# Altium footprint library Package_BGA.PcbLib: 230 footprints (part 1 of 28)
Each footprint in its own frame and in the unit in brackets; x right, y up, seen from the top. Pads: shape width x height; smd on the part's side, far side on the other; paste and mask are expansions set on the pad; w line width, h text height; cw(c..) or ccw(c..) is an arc to the next point about the centre after c.
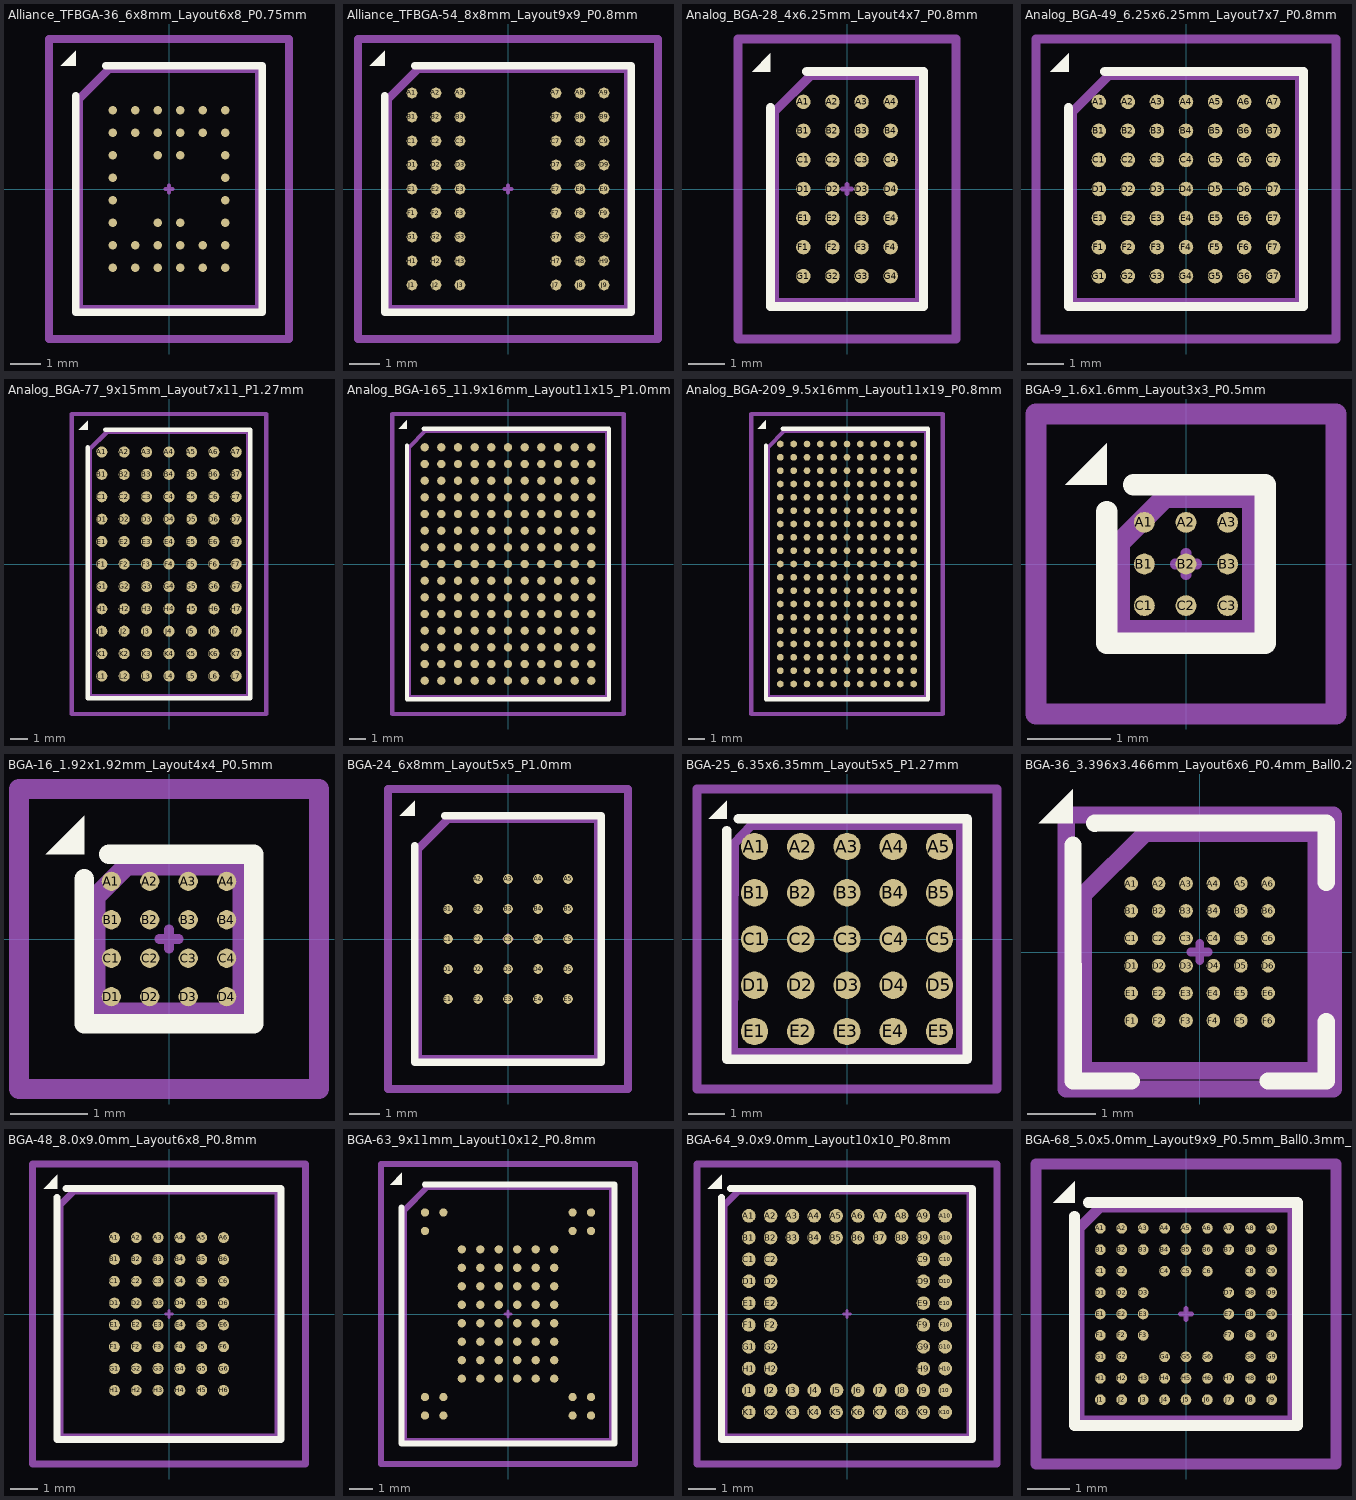
[diagram p0: the footprints below, top view; thin cyan lines are the x and y axes]

## Alliance_TFBGA-36_6x8mm_Layout6x8_P0.75mm [mm] "Alliance_TFBGA-36_6x8mm_Layout6x8_P0.75mm"
pads (36):
  round 0.28 smd: A1(-1.875,2.625) A2(-1.125,2.625) A3(-0.375,2.625) A4(0.375,2.625) A5(1.125,2.625) A6(1.875,2.625) B1(-1.875,1.875) B2(-1.125,1.875) B3(-0.375,1.875) B4(0.375,1.875) B5(1.125,1.875) B6(1.875,1.875) C1(-1.875,1.125) C3(-0.375,1.125) C4(0.375,1.125) C6(1.875,1.125) D1(-1.875,0.375) D6(1.875,0.375) E1(-1.875,-0.375) E6(1.875,-0.375) F1(-1.875,-1.125) F3(-0.375,-1.125) F4(0.375,-1.125) F6(1.875,-1.125) G1(-1.875,-1.875) G2(-1.125,-1.875) G3(-0.375,-1.875) G4(0.375,-1.875) G5(1.125,-1.875) G6(1.875,-1.875) H1(-1.875,-2.625) H2(-1.125,-2.625) H3(-0.375,-2.625) H4(0.375,-2.625) H5(1.125,-2.625) H6(1.875,-2.625)
F.SilkS:
  region: -3.11,4.11 -3.61,4.11 -3.11,4.61
  lines w0.254: -3.11,3.11 -3.11,-4.11 3.11,-4.11 3.11,4.11 -2.11,4.11
Top Component Center:
  lines w0.127: -0.127,0 0.127,0 -0.127,0 ; 0,-0.127 0,0.127 0,-0.127
Top Assembly:
  lines w0.254: -3,-4 3,-4 3,4 -2,4 -3,3 -3,-4
Top Courtyard:
  lines w0.254: -4,-5 4,-5 4,5 -4,5 -4,-5
Top Designator:
  text ".Designator" at -3.432,-0.345 h1.52

## Alliance_TFBGA-54_8x8mm_Layout9x9_P0.8mm [mm] "Alliance_TFBGA-54_8x8mm_Layout9x9_P0.8mm"
pads (54):
  round 0.36 smd: A1(-3.2,3.2) A2(-2.4,3.2) A3(-1.6,3.2) A7(1.6,3.2) A8(2.4,3.2) A9(3.2,3.2) B1(-3.2,2.4) B2(-2.4,2.4) B3(-1.6,2.4) B7(1.6,2.4) B8(2.4,2.4) B9(3.2,2.4) C1(-3.2,1.6) C2(-2.4,1.6) C3(-1.6,1.6) C7(1.6,1.6) C8(2.4,1.6) C9(3.2,1.6) D1(-3.2,0.8) D2(-2.4,0.8) D3(-1.6,0.8) D7(1.6,0.8) D8(2.4,0.8) D9(3.2,0.8) E1(-3.2,0) E2(-2.4,0) E3(-1.6,0) E7(1.6,0) E8(2.4,0) E9(3.2,0) F1(-3.2,-0.8) F2(-2.4,-0.8) F3(-1.6,-0.8) F7(1.6,-0.8) F8(2.4,-0.8) F9(3.2,-0.8) G1(-3.2,-1.6) G2(-2.4,-1.6) G3(-1.6,-1.6) G7(1.6,-1.6) G8(2.4,-1.6) G9(3.2,-1.6) H1(-3.2,-2.4) H2(-2.4,-2.4) H3(-1.6,-2.4) H7(1.6,-2.4) H8(2.4,-2.4) H9(3.2,-2.4) J1(-3.2,-3.2) J2(-2.4,-3.2) J3(-1.6,-3.2) J7(1.6,-3.2) J8(2.4,-3.2) J9(3.2,-3.2)
F.SilkS:
  region: -4.11,4.11 -4.61,4.11 -4.11,4.61
  lines w0.254: -4.11,3.11 -4.11,-4.11 4.11,-4.11 4.11,4.11 -3.11,4.11
Top Component Center:
  lines w0.127: -0.127,0 0.127,0 -0.127,0 ; 0,-0.127 0,0.127 0,-0.127
Top Assembly:
  lines w0.254: -4,-4 -4,3 -3,4 4,4 4,-4 -4,-4
Top Courtyard:
  lines w0.254: -5,-5 -5,5 5,5 5,-5 -5,-5
Top Designator:
  text ".Designator" at -3.432,-0.345 h1.52

## Analog_BGA-28_4x6.25mm_Layout4x7_P0.8mm [mm] "Analog_BGA-28_4x6.25mm_Layout4x7_P0.8mm"
pads (28):
  round 0.4 smd: A1(-1.2,2.4) A2(-0.4,2.4) A3(0.4,2.4) A4(1.2,2.4) B1(-1.2,1.6) B2(-0.4,1.6) B3(0.4,1.6) B4(1.2,1.6) C1(-1.2,0.8) C2(-0.4,0.8) C3(0.4,0.8) C4(1.2,0.8) D1(-1.2,0) D2(-0.4,0) D3(0.4,0) D4(1.2,0) E1(-1.2,-0.8) E2(-0.4,-0.8) E3(0.4,-0.8) E4(1.2,-0.8) F1(-1.2,-1.6) F2(-0.4,-1.6) F3(0.4,-1.6) F4(1.2,-1.6) G1(-1.2,-2.4) G2(-0.4,-2.4) G3(0.4,-2.4) G4(1.2,-2.4)
F.SilkS:
  region: -2.11,3.235 -2.61,3.235 -2.11,3.735
  lines w0.254: -2.11,2.235 -2.11,-3.235 2.11,-3.235 2.11,3.235 -1.11,3.235
Top Component Center:
  lines w0.127: -0.127,0 0.127,0 -0.127,0 ; 0,-0.127 0,0.127 0,-0.127
Top Assembly:
  lines w0.254: -2,-3.125 -2,2.125 -1,3.125 2,3.125 2,-3.125 -2,-3.125
Top Courtyard:
  lines w0.254: -3,-4.13 -3,4.13 3,4.13 3,-4.13 -3,-4.13
Top Designator:
  text ".Designator" at -3.432,-0.345 h1.52

## Analog_BGA-49_6.25x6.25mm_Layout7x7_P0.8mm [mm] "Analog_BGA-49_6.25x6.25mm_Layout7x7_P0.8mm"
pads (49):
  round 0.4 smd: A1(-2.4,2.4) A2(-1.6,2.4) A3(-0.8,2.4) A4(0,2.4) A5(0.8,2.4) A6(1.6,2.4) A7(2.4,2.4) B1(-2.4,1.6) B2(-1.6,1.6) B3(-0.8,1.6) B4(0,1.6) B5(0.8,1.6) B6(1.6,1.6) B7(2.4,1.6) C1(-2.4,0.8) C2(-1.6,0.8) C3(-0.8,0.8) C4(0,0.8) C5(0.8,0.8) C6(1.6,0.8) C7(2.4,0.8) D1(-2.4,0) D2(-1.6,0) D3(-0.8,0) D4(0,0) D5(0.8,0) D6(1.6,0) D7(2.4,0) E1(-2.4,-0.8) E2(-1.6,-0.8) E3(-0.8,-0.8) E4(0,-0.8) E5(0.8,-0.8) E6(1.6,-0.8) E7(2.4,-0.8) F1(-2.4,-1.6) F2(-1.6,-1.6) F3(-0.8,-1.6) F4(0,-1.6) F5(0.8,-1.6) F6(1.6,-1.6) F7(2.4,-1.6) G1(-2.4,-2.4) G2(-1.6,-2.4) G3(-0.8,-2.4) G4(0,-2.4) G5(0.8,-2.4) G6(1.6,-2.4) G7(2.4,-2.4)
F.SilkS:
  region: -3.235,3.235 -3.735,3.235 -3.235,3.735
  lines w0.254: -3.235,2.235 -3.235,-3.235 3.235,-3.235 3.235,3.235 -2.235,3.235
Top Component Center:
  lines w0.127: -0.127,0 0.127,0 -0.127,0 ; 0,-0.127 0,0.127 0,-0.127
Top Assembly:
  lines w0.254: -3.125,-3.125 -3.125,2.125 -2.125,3.125 3.125,3.125 3.125,-3.125 -3.125,-3.125
Top Courtyard:
  lines w0.254: -4.13,-4.13 -4.13,4.13 4.13,4.13 4.13,-4.13 -4.13,-4.13
Top Designator:
  text ".Designator" at -3.432,-0.345 h1.52
3D body "Analog_BGA-49_6.25x6.25mm_Layout7x7_P0.8mm.step": height 2.1, standoff -0.01, extent -3.125,-3.125 3.125,3.125
3D body "Analog_BGA-49_6.25x6.25mm_Layout7x7_P0.8mm.step": height 2.1, standoff -0.01, extent -3.125,-3.125 3.125,3.125

## Analog_BGA-77_9x15mm_Layout7x11_P1.27mm [mm] "Analog_BGA-77_9x15mm_Layout7x11_P1.27mm"
pads (77):
  round 0.63 smd: A1(-3.81,6.35) A2(-2.54,6.35) A3(-1.27,6.35) A4(0,6.35) A5(1.27,6.35) A6(2.54,6.35) A7(3.81,6.35) B1(-3.81,5.08) B2(-2.54,5.08) B3(-1.27,5.08) B4(0,5.08) B5(1.27,5.08) B6(2.54,5.08) B7(3.81,5.08) C1(-3.81,3.81) C2(-2.54,3.81) C3(-1.27,3.81) C4(0,3.81) C5(1.27,3.81) C6(2.54,3.81) C7(3.81,3.81) D1(-3.81,2.54) D2(-2.54,2.54) D3(-1.27,2.54) D4(0,2.54) D5(1.27,2.54) D6(2.54,2.54) D7(3.81,2.54) E1(-3.81,1.27) E2(-2.54,1.27) E3(-1.27,1.27) E4(0,1.27) E5(1.27,1.27) E6(2.54,1.27) E7(3.81,1.27) F1(-3.81,0) F2(-2.54,0) F3(-1.27,0) F4(0,0) F5(1.27,0) F6(2.54,0) F7(3.81,0) G1(-3.81,-1.27) G2(-2.54,-1.27) G3(-1.27,-1.27) G4(0,-1.27) G5(1.27,-1.27) G6(2.54,-1.27) G7(3.81,-1.27) H1(-3.81,-2.54) H2(-2.54,-2.54) H3(-1.27,-2.54) H4(0,-2.54) H5(1.27,-2.54) H6(2.54,-2.54) H7(3.81,-2.54) J1(-3.81,-3.81) J2(-2.54,-3.81) J3(-1.27,-3.81) J4(0,-3.81) J5(1.27,-3.81) J6(2.54,-3.81) J7(3.81,-3.81) K1(-3.81,-5.08) K2(-2.54,-5.08) K3(-1.27,-5.08) K4(0,-5.08) K5(1.27,-5.08) K6(2.54,-5.08) K7(3.81,-5.08) L1(-3.81,-6.35) L2(-2.54,-6.35) L3(-1.27,-6.35) L4(0,-6.35) L5(1.27,-6.35) L6(2.54,-6.35) L7(3.81,-6.35)
F.SilkS:
  region: -4.61,7.61 -5.11,7.61 -4.61,8.11
  lines w0.254: -4.61,6.61 -4.61,-7.61 4.61,-7.61 4.61,7.61 -3.61,7.61
Top Component Center:
  lines w0.127: -0.127,0 0.127,0 -0.127,0 ; 0,-0.127 0,0.127 0,-0.127
Top Assembly:
  lines w0.254: -4.5,-7.5 4.5,-7.5 4.5,7.5 -3.5,7.5 -4.5,6.5 -4.5,-7.5
Top Courtyard:
  lines w0.254: -5.5,-8.5 5.5,-8.5 5.5,8.5 -5.5,8.5 -5.5,-8.5
Top Designator:
  text ".Designator" at -3.432,-0.345 h1.52
3D body "Analog_BGA-77_9x15mm_Layout7x11_P1.27mm.step": height 2.37, standoff -0.07, extent -4.5,-7.5 4.5,7.5

## Analog_BGA-165_11.9x16mm_Layout11x15_P1.0mm [mm] "Analog_BGA-165_11.9x16mm_Layout11x15_P1.0mm"
pads (165):
  round 0.5 smd: A1(-5,7) A2(-4,7) A3(-3,7) A4(-2,7) A5(-1,7) A6(0,7) A7(1,7) A8(2,7) A9(3,7) A10(4,7) A11(5,7) B1(-5,6) B2(-4,6) B3(-3,6) B4(-2,6) B5(-1,6) B6(0,6) B7(1,6) B8(2,6) B9(3,6) B10(4,6) B11(5,6) C1(-5,5) C2(-4,5) C3(-3,5) C4(-2,5) C5(-1,5) C6(0,5) C7(1,5) C8(2,5) C9(3,5) C10(4,5) C11(5,5) D1(-5,4) D2(-4,4) D3(-3,4) D4(-2,4) D5(-1,4) D6(0,4) D7(1,4) D8(2,4) D9(3,4) D10(4,4) D11(5,4) E1(-5,3) E2(-4,3) E3(-3,3) E4(-2,3) E5(-1,3) E6(0,3) E7(1,3) E8(2,3) E9(3,3) E10(4,3) E11(5,3) F1(-5,2) F2(-4,2) F3(-3,2) F4(-2,2) F5(-1,2) F6(0,2) F7(1,2) F8(2,2) F9(3,2) F10(4,2) F11(5,2) G1(-5,1) G2(-4,1) G3(-3,1) G4(-2,1) G5(-1,1) G6(0,1) G7(1,1) G8(2,1) G9(3,1) G10(4,1) G11(5,1) H1(-5,0) H2(-4,0) H3(-3,0) H4(-2,0) H5(-1,0) H6(0,0) H7(1,0) H8(2,0) H9(3,0) H10(4,0) H11(5,0) J1(-5,-1) J2(-4,-1) J3(-3,-1) J4(-2,-1) J5(-1,-1) J6(0,-1) J7(1,-1) J8(2,-1) J9(3,-1) J10(4,-1) J11(5,-1) K1(-5,-2) K2(-4,-2) K3(-3,-2) K4(-2,-2) K5(-1,-2) K6(0,-2) K7(1,-2) K8(2,-2) K9(3,-2) K10(4,-2) K11(5,-2) L1(-5,-3) L2(-4,-3) L3(-3,-3) L4(-2,-3) L5(-1,-3) L6(0,-3) L7(1,-3) L8(2,-3) L9(3,-3) L10(4,-3) L11(5,-3) M1(-5,-4) M2(-4,-4) M3(-3,-4) M4(-2,-4) M5(-1,-4) M6(0,-4) M7(1,-4) M8(2,-4) M9(3,-4) M10(4,-4) M11(5,-4) N1(-5,-5) N2(-4,-5) N3(-3,-5) N4(-2,-5) N5(-1,-5) N6(0,-5) N7(1,-5) N8(2,-5) N9(3,-5) N10(4,-5) N11(5,-5) P1(-5,-6) P2(-4,-6) P3(-3,-6) P4(-2,-6) P5(-1,-6) P6(0,-6) P7(1,-6) P8(2,-6) P9(3,-6) P10(4,-6) P11(5,-6) R1(-5,-7) R2(-4,-7) R3(-3,-7) R4(-2,-7) R5(-1,-7) R6(0,-7) R7(1,-7) R8(2,-7) R9(3,-7) R10(4,-7) R11(5,-7)
F.SilkS:
  region: -6.06,8.11 -6.56,8.11 -6.06,8.61
  lines w0.254: -6.06,7.11 -6.06,-8.11 6.06,-8.11 6.06,8.11 -5.06,8.11
Top Component Center:
  lines w0.127: -0.127,0 0.127,0 -0.127,0 ; 0,-0.127 0,0.127 0,-0.127
Top Assembly:
  lines w0.254: -5.95,-8 -5.95,7 -4.95,8 5.95,8 5.95,-8 -5.95,-8
Top Courtyard:
  lines w0.254: -6.95,-9 -6.95,9 6.95,9 6.95,-9 -6.95,-9
Top Designator:
  text ".Designator" at -3.432,-0.345 h1.52
3D body "Analog_BGA-165_11.9x16mm_Layout11x15_P1.0mm.step": height 3.32, standoff -0.02, extent -5.95,-8 5.95,8

## Analog_BGA-209_9.5x16mm_Layout11x19_P0.8mm [mm] "Analog_BGA-209_9.5x16mm_Layout11x19_P0.8mm"
pads (209):
  round 0.4 smd: A1(-4,7.2) A2(-3.2,7.2) A3(-2.4,7.2) A4(-1.6,7.2) A5(-0.8,7.2) A6(0,7.2) A7(0.8,7.2) A8(1.6,7.2) A9(2.4,7.2) A10(3.2,7.2) A11(4,7.2) B1(-4,6.4) B2(-3.2,6.4) B3(-2.4,6.4) B4(-1.6,6.4) B5(-0.8,6.4) B6(0,6.4) B7(0.8,6.4) B8(1.6,6.4) B9(2.4,6.4) B10(3.2,6.4) B11(4,6.4) C1(-4,5.6) C2(-3.2,5.6) C3(-2.4,5.6) C4(-1.6,5.6) C5(-0.8,5.6) C6(0,5.6) C7(0.8,5.6) C8(1.6,5.6) C9(2.4,5.6) C10(3.2,5.6) C11(4,5.6) D1(-4,4.8) D2(-3.2,4.8) D3(-2.4,4.8) D4(-1.6,4.8) D5(-0.8,4.8) D6(0,4.8) D7(0.8,4.8) D8(1.6,4.8) D9(2.4,4.8) D10(3.2,4.8) D11(4,4.8) E1(-4,4) E2(-3.2,4) E3(-2.4,4) E4(-1.6,4) E5(-0.8,4) E6(0,4) E7(0.8,4) E8(1.6,4) E9(2.4,4) E10(3.2,4) E11(4,4) F1(-4,3.2) F2(-3.2,3.2) F3(-2.4,3.2) F4(-1.6,3.2) F5(-0.8,3.2) F6(0,3.2) F7(0.8,3.2) F8(1.6,3.2) F9(2.4,3.2) F10(3.2,3.2) F11(4,3.2) G1(-4,2.4) G2(-3.2,2.4) G3(-2.4,2.4) G4(-1.6,2.4) G5(-0.8,2.4) G6(0,2.4) G7(0.8,2.4) G8(1.6,2.4) G9(2.4,2.4) G10(3.2,2.4) G11(4,2.4) H1(-4,1.6) H2(-3.2,1.6) H3(-2.4,1.6) H4(-1.6,1.6) H5(-0.8,1.6) H6(0,1.6) H7(0.8,1.6) H8(1.6,1.6) H9(2.4,1.6) H10(3.2,1.6) H11(4,1.6) J1(-4,0.8) J2(-3.2,0.8) J3(-2.4,0.8) J4(-1.6,0.8) J5(-0.8,0.8) J6(0,0.8) J7(0.8,0.8) J8(1.6,0.8) J9(2.4,0.8) J10(3.2,0.8) J11(4,0.8) K1(-4,0) K2(-3.2,0) K3(-2.4,0) K4(-1.6,0) K5(-0.8,0) K6(0,0) K7(0.8,0) K8(1.6,0) K9(2.4,0) K10(3.2,0) K11(4,0) L1(-4,-0.8) L2(-3.2,-0.8) L3(-2.4,-0.8) L4(-1.6,-0.8) L5(-0.8,-0.8) L6(0,-0.8) L7(0.8,-0.8) L8(1.6,-0.8) L9(2.4,-0.8) L10(3.2,-0.8) L11(4,-0.8) M1(-4,-1.6) M2(-3.2,-1.6) M3(-2.4,-1.6) M4(-1.6,-1.6) M5(-0.8,-1.6) M6(0,-1.6) M7(0.8,-1.6) M8(1.6,-1.6) M9(2.4,-1.6) M10(3.2,-1.6) M11(4,-1.6) N1(-4,-2.4) N2(-3.2,-2.4) N3(-2.4,-2.4) N4(-1.6,-2.4) N5(-0.8,-2.4) N6(0,-2.4) N7(0.8,-2.4) N8(1.6,-2.4) N9(2.4,-2.4) N10(3.2,-2.4) N11(4,-2.4) P1(-4,-3.2) P2(-3.2,-3.2) P3(-2.4,-3.2) P4(-1.6,-3.2) P5(-0.8,-3.2) P6(0,-3.2) P7(0.8,-3.2) P8(1.6,-3.2) P9(2.4,-3.2) P10(3.2,-3.2) P11(4,-3.2) R1(-4,-4) R2(-3.2,-4) R3(-2.4,-4) R4(-1.6,-4) R5(-0.8,-4) R6(0,-4) R7(0.8,-4) R8(1.6,-4) R9(2.4,-4) R10(3.2,-4) R11(4,-4) T1(-4,-4.8) T2(-3.2,-4.8) T3(-2.4,-4.8) T4(-1.6,-4.8) T5(-0.8,-4.8) T6(0,-4.8) T7(0.8,-4.8) T8(1.6,-4.8) T9(2.4,-4.8) T10(3.2,-4.8) T11(4,-4.8) U1(-4,-5.6) U2(-3.2,-5.6) U3(-2.4,-5.6) U4(-1.6,-5.6) U5(-0.8,-5.6) U6(0,-5.6) U7(0.8,-5.6) U8(1.6,-5.6) U9(2.4,-5.6) U10(3.2,-5.6) U11(4,-5.6) V1(-4,-6.4) V2(-3.2,-6.4) V3(-2.4,-6.4) V4(-1.6,-6.4) V5(-0.8,-6.4) V6(0,-6.4) V7(0.8,-6.4) V8(1.6,-6.4) V9(2.4,-6.4) V10(3.2,-6.4) V11(4,-6.4) W1(-4,-7.2) W2(-3.2,-7.2) W3(-2.4,-7.2) W4(-1.6,-7.2) W5(-0.8,-7.2) W6(0,-7.2) W7(0.8,-7.2) W8(1.6,-7.2) W9(2.4,-7.2) W10(3.2,-7.2) W11(4,-7.2)
F.SilkS:
  region: -4.86,8.11 -5.36,8.11 -4.86,8.61
  lines w0.254: -4.86,7.11 -4.86,-8.11 4.86,-8.11 4.86,8.11 -3.86,8.11
Top Component Center:
  lines w0.127: -0.127,0 0.127,0 -0.127,0 ; 0,-0.127 0,0.127 0,-0.127
Top Assembly:
  lines w0.254: -4.75,-8 4.75,-8 4.75,8 -3.75,8 -4.75,7 -4.75,-8
Top Courtyard:
  lines w0.254: -5.75,-9 5.75,-9 5.75,9 -5.75,9 -5.75,-9
Top Designator:
  text ".Designator" at -3.432,-0.345 h1.52
3D body "Analog_BGA-209_9.5x16mm_Layout11x19_P0.8mm.step": height 4.72, standoff -0.01, extent -4.75,-8 4.75,8
3D body "Analog_BGA-209_9.5x16mm_Layout11x19_P0.8mm.step": height 4.72, standoff -0.01, extent -4.75,-8 4.75,8

## BGA-9_1.6x1.6mm_Layout3x3_P0.5mm [mm] "BGA-9_1.6x1.6mm_Layout3x3_P0.5mm"
pads (9):
  round 0.25 smd: A1(-0.5,0.5) A2(0,0.5) A3(0.5,0.5) B1(-0.5,0) B2(0,0) B3(0.5,0) C1(-0.5,-0.5) C2(0,-0.5) C3(0.5,-0.5)
F.SilkS:
  region: -0.95,0.95 -1.45,0.95 -0.95,1.45
  lines w0.254: -0.95,0.63 -0.95,-0.95 0.95,-0.95 0.95,0.95 -0.63,0.95
Top Component Center:
  lines w0.127: -0.127,0 0.127,0 -0.127,0 ; 0,-0.127 0,0.127 0,-0.127
Top Assembly:
  lines w0.254: -0.8,-0.8 -0.8,0.25 -0.25,0.8 0.8,0.8 0.8,-0.8 -0.8,-0.8
Top Courtyard:
  lines w0.254: -1.8,-1.8 -1.8,1.8 1.8,1.8 1.8,-1.8 -1.8,-1.8
Top Designator:
  text ".Designator" at -2.253,-0.226 h1
3D body "BGA-9_1.6x1.6mm_Layout3x3_P0.5mm.step": height 0.63, standoff -0.01, extent -0.8,-0.8 0.8,0.8
3D body "BGA-9_1.6x1.6mm_Layout3x3_P0.5mm.step": height 0.63, standoff -0.01, extent -0.8,-0.8 0.8,0.8

## BGA-16_1.92x1.92mm_Layout4x4_P0.5mm [mm] "BGA-16_1.92x1.92mm_Layout4x4_P0.5mm"
pads (16):
  round 0.25 smd: A1(-0.75,0.75) A2(-0.25,0.75) A3(0.25,0.75) A4(0.75,0.75) B1(-0.75,0.25) B2(-0.25,0.25) B3(0.25,0.25) B4(0.75,0.25) C1(-0.75,-0.25) C2(-0.25,-0.25) C3(0.25,-0.25) C4(0.75,-0.25) D1(-0.75,-0.75) D2(-0.25,-0.75) D3(0.25,-0.75) D4(0.75,-0.75)
F.SilkS:
  region: -1.1,1.1 -1.6,1.1 -1.1,1.6
  lines w0.254: -1.1,0.78 -1.1,-1.1 1.1,-1.1 1.1,1.1 -0.78,1.1
Top Component Center:
  lines w0.127: -0.127,0 0.127,0 -0.127,0 ; 0,-0.127 0,0.127 0,-0.127
Top Assembly:
  lines w0.254: -0.95,-0.95 -0.95,0.55 -0.55,0.95 0.95,0.95 0.95,-0.95 -0.95,-0.95
Top Courtyard:
  lines w0.254: -1.95,-1.95 -1.95,1.95 1.95,1.95 1.95,-1.95 -1.95,-1.95
Top Designator:
  text ".Designator" at -3.432,-0.345 h1.52
3D body "BGA-16_1.92x1.92mm_Layout4x4_P0.5mm.step": height 0.65, standoff -0.01, extent -0.96,-0.96 0.96,0.96
3D body "BGA-16_1.92x1.92mm_Layout4x4_P0.5mm.step": height 0.65, standoff -0.01, extent -0.96,-0.96 0.96,0.96

## BGA-24_6x8mm_Layout5x5_P1.0mm [mm] "BGA-24_6x8mm_Layout5x5_P1.0mm"
pads (24):
  round 0.32 smd: A2(-1,2) A3(0,2) A4(1,2) A5(2,2) B1(-2,1) B2(-1,1) B3(0,1) B4(1,1) B5(2,1) C1(-2,0) C2(-1,0) C3(0,0) C4(1,0) C5(2,0) D1(-2,-1) D2(-1,-1) D3(0,-1) D4(1,-1) D5(2,-1) E1(-2,-2) E2(-1,-2) E3(0,-2) E4(1,-2) E5(2,-2)
F.SilkS:
  region: -3.11,4.11 -3.61,4.11 -3.11,4.61
  lines w0.254: -3.11,3.11 -3.11,-4.11 3.11,-4.11 3.11,4.11 -2.11,4.11
Top Component Center:
  lines w0.127: -0.127,0 0.127,0 -0.127,0 ; 0,-0.127 0,0.127 0,-0.127
Top Assembly:
  lines w0.254: -3,-4 3,-4 3,4 -2,4 -3,3 -3,-4
Top Courtyard:
  lines w0.254: -4,-5 4,-5 4,5 -4,5 -4,-5
Top Designator:
  text ".Designator" at -3.432,-0.345 h1.52

## BGA-25_6.35x6.35mm_Layout5x5_P1.27mm [mm] "BGA-25_6.35x6.35mm_Layout5x5_P1.27mm"
pads (25):
  round 0.75 smd: A1(-2.54,2.54) A2(-1.27,2.54) A3(0,2.54) A4(1.27,2.54) A5(2.54,2.54) B1(-2.54,1.27) B2(-1.27,1.27) B3(0,1.27) B4(1.27,1.27) B5(2.54,1.27) C1(-2.54,0) C2(-1.27,0) C3(0,0) C4(1.27,0) C5(2.54,0) D1(-2.54,-1.27) D2(-1.27,-1.27) D3(0,-1.27) D4(1.27,-1.27) D5(2.54,-1.27) E1(-2.54,-2.54) E2(-1.27,-2.54) E3(0,-2.54) E4(1.27,-2.54) E5(2.54,-2.54)
F.SilkS:
  region: -3.3,3.3 -3.8,3.3 -3.3,3.8
  lines w0.254: -3.3,2.98 -3.3,-3.3 3.3,-3.3 3.3,3.3 -2.99,3.3
Top Component Center:
  lines w0.127: -0.127,0 0.127,0 -0.127,0 ; 0,-0.127 0,0.127 0,-0.127
Top Assembly:
  lines w0.254: -3.12,-3.12 -3.1,2.62 -2.62,3.12 3.12,3.12 3.12,-3.12 -3.12,-3.12
Top Courtyard:
  lines w0.254: -4.12,-4.12 -4.12,4.12 4.12,4.12 4.12,-4.12 -4.12,-4.12
Top Designator:
  text ".Designator" at -3.432,-0.345 h1.52
3D body "BGA-25_6.35x6.35mm_Layout5x5_P1.27mm.step": height 5.01, standoff -0.02, extent -3.125,-3.125 3.125,3.125

## BGA-36_3.396x3.466mm_Layout6x6_P0.4mm_Ball0.25mm_Pad0.2mm_NSMD [mm] "BGA-36_3.396x3.466mm_Layout6x6_P0.4mm_Ball0.25mm_Pad0.2mm_NSMD"
pads (36):
  round 0.2 smd: A1(-1,1) A2(-0.6,1) A3(-0.2,1) A4(0.2,1) A5(0.6,1) A6(1,1) B1(-1,0.6) B2(-0.6,0.6) B3(-0.2,0.6) B4(0.2,0.6) B5(0.6,0.6) B6(1,0.6) C1(-1,0.2) C2(-0.6,0.2) C3(-0.2,0.2) C4(0.2,0.2) C5(0.6,0.2) C6(1,0.2) D1(-1,-0.2) D2(-0.6,-0.2) D3(-0.2,-0.2) D4(0.2,-0.2) D5(0.6,-0.2) D6(1,-0.2) E1(-1,-0.6) E2(-0.6,-0.6) E3(-0.2,-0.6) E4(0.2,-0.6) E5(0.6,-0.6) E6(1,-0.6) F1(-1,-1) F2(-0.6,-1) F3(-0.2,-1) F4(0.2,-1) F5(0.6,-1) F6(1,-1)
F.SilkS:
  region: -1.85,1.88 -2.35,1.88 -1.85,2.38
  lines w0.254: -1.85,1.56 -1.848,-1.883 -0.999,-1.883 ; -1.53,1.88 1.848,1.883 ; 0.999,-1.883 1.848,-1.883 1.848,-1.017 ; 1.848,1.017 1.848,1.883 ; 1.848,1.017 1.848,1.883 ; 1.848,1.017 1.848,1.883 ; 1.848,1.883 0.999,1.883 1.848,1.883
Top Component Center:
  lines w0.127: -0.127,0 0.127,0 -0.127,0 ; 0,-0.127 0,0.127 0,-0.127
Top Assembly:
  lines w0.254: -1.698,-1.733 1.698,-1.733 1.698,1.733 -0.798,1.733 -1.698,0.833 -1.698,-1.733
Top Courtyard:
  lines w0.254: -1.95,-2 1.95,-2 1.95,2 -1.95,2 -1.95,-2
Top Designator:
  text ".Designator" at -3.432,-0.345 h1.52

## BGA-48_8.0x9.0mm_Layout6x8_P0.8mm [mm] "BGA-48_8.0x9.0mm_Layout6x8_P0.8mm"
pads (48):
  round 0.4 smd: A1(-2,2.8) A2(-1.2,2.8) A3(-0.4,2.8) A4(0.4,2.8) A5(1.2,2.8) A6(2,2.8) B1(-2,2) B2(-1.2,2) B3(-0.4,2) B4(0.4,2) B5(1.2,2) B6(2,2) C1(-2,1.2) C2(-1.2,1.2) C3(-0.4,1.2) C4(0.4,1.2) C5(1.2,1.2) C6(2,1.2) D1(-2,0.4) D2(-1.2,0.4) D3(-0.4,0.4) D4(0.4,0.4) D5(1.2,0.4) D6(2,0.4) E1(-2,-0.4) E2(-1.2,-0.4) E3(-0.4,-0.4) E4(0.4,-0.4) E5(1.2,-0.4) E6(2,-0.4) F1(-2,-1.2) F2(-1.2,-1.2) F3(-0.4,-1.2) F4(0.4,-1.2) F5(1.2,-1.2) F6(2,-1.2) G1(-2,-2) G2(-1.2,-2) G3(-0.4,-2) G4(0.4,-2) G5(1.2,-2) G6(2,-2) H1(-2,-2.8) H2(-1.2,-2.8) H3(-0.4,-2.8) H4(0.4,-2.8) H5(1.2,-2.8) H6(2,-2.8)
F.SilkS:
  region: -4.1,4.6 -4.6,4.6 -4.1,5.1
  lines w0.254: -4.1,4.28 -4.1,-4.6 4.1,-4.6 4.1,4.6 -3.78,4.6
Top Component Center:
  lines w0.127: -0.127,0 0.127,0 -0.127,0 ; 0,-0.127 0,0.127 0,-0.127
Top Assembly:
  lines w0.254: -4,-4.5 -4,4 -3.5,4.5 4,4.5 4,-4.5 -4,-4.5
Top Courtyard:
  lines w0.254: -5,-5.5 -5,5.5 5,5.5 5,-5.5 -5,-5.5
Top Designator:
  text ".Designator" at -3.432,-0.345 h1.52
3D body "BGA-48_8.0x9.0mm_Layout6x8_P0.8mm.step": height 1.2, standoff -0.01, extent -4,-4.5 4,4.5

## BGA-63_9x11mm_Layout10x12_P0.8mm [mm] "BGA-63_9x11mm_Layout10x12_P0.8mm"
pads (63):
  round 0.36 smd: A1(-3.6,4.4) A2(-2.8,4.4) A9(2.8,4.4) A10(3.6,4.4) B1(-3.6,3.6) B9(2.8,3.6) B10(3.6,3.6) C3(-2,2.8) C4(-1.2,2.8) C5(-0.4,2.8) C6(0.4,2.8) C7(1.2,2.8) C8(2,2.8) D3(-2,2) D4(-1.2,2) D5(-0.4,2) D6(0.4,2) D7(1.2,2) D8(2,2) E3(-2,1.2) E4(-1.2,1.2) E5(-0.4,1.2) E6(0.4,1.2) E7(1.2,1.2) E8(2,1.2) F3(-2,0.4) F4(-1.2,0.4) F5(-0.4,0.4) F6(0.4,0.4) F7(1.2,0.4) F8(2,0.4) G3(-2,-0.4) G4(-1.2,-0.4) G5(-0.4,-0.4) G6(0.4,-0.4) G7(1.2,-0.4) G8(2,-0.4) H3(-2,-1.2) H4(-1.2,-1.2) H5(-0.4,-1.2) H6(0.4,-1.2) H7(1.2,-1.2) H8(2,-1.2) J3(-2,-2) J4(-1.2,-2) J5(-0.4,-2) J6(0.4,-2) J7(1.2,-2) J8(2,-2) K3(-2,-2.8) K4(-1.2,-2.8) K5(-0.4,-2.8) K6(0.4,-2.8) K7(1.2,-2.8) K8(2,-2.8) L1(-3.6,-3.6) L2(-2.8,-3.6) L9(2.8,-3.6) L10(3.6,-3.6) M1(-3.6,-4.4) M2(-2.8,-4.4) M9(2.8,-4.4) M10(3.6,-4.4)
F.SilkS:
  region: -4.61,5.61 -5.11,5.61 -4.61,6.11
  lines w0.254: -4.61,4.61 -4.61,-5.61 4.61,-5.61 4.61,5.61 -3.61,5.61
Top Component Center:
  lines w0.127: -0.127,0 0.127,0 -0.127,0 ; 0,-0.127 0,0.127 0,-0.127
Top Assembly:
  lines w0.254: -4.5,-5.5 4.5,-5.5 4.5,5.5 -3.5,5.5 -4.5,4.5 -4.5,-5.5
Top Courtyard:
  lines w0.254: -5.5,-6.5 5.5,-6.5 5.5,6.5 -5.5,6.5 -5.5,-6.5
Top Designator:
  text ".Designator" at -3.432,-0.345 h1.52

## BGA-64_9.0x9.0mm_Layout10x10_P0.8mm [mm] "BGA-64_9.0x9.0mm_Layout10x10_P0.8mm"
pads (64):
  round 0.5 smd: A1(-3.6,3.6) A2(-2.8,3.6) A3(-2,3.6) A4(-1.2,3.6) A5(-0.4,3.6) A6(0.4,3.6) A7(1.2,3.6) A8(2,3.6) A9(2.8,3.6) A10(3.6,3.6) B1(-3.6,2.8) B2(-2.8,2.8) B3(-2,2.8) B4(-1.2,2.8) B5(-0.4,2.8) B6(0.4,2.8) B7(1.2,2.8) B8(2,2.8) B9(2.8,2.8) B10(3.6,2.8) C1(-3.6,2) C2(-2.8,2) C9(2.8,2) C10(3.6,2) D1(-3.6,1.2) D2(-2.8,1.2) D9(2.8,1.2) D10(3.6,1.2) E1(-3.6,0.4) E2(-2.8,0.4) E9(2.8,0.4) E10(3.6,0.4) F1(-3.6,-0.4) F2(-2.8,-0.4) F9(2.8,-0.4) F10(3.6,-0.4) G1(-3.6,-1.2) G2(-2.8,-1.2) G9(2.8,-1.2) G10(3.6,-1.2) H1(-3.6,-2) H2(-2.8,-2) H9(2.8,-2) H10(3.6,-2) J1(-3.6,-2.8) J2(-2.8,-2.8) J3(-2,-2.8) J4(-1.2,-2.8) J5(-0.38,-2.79) J6(0.4,-2.8) J7(1.2,-2.8) J8(2,-2.8) J9(2.8,-2.8) J10(3.6,-2.8) K1(-3.6,-3.6) K2(-2.8,-3.6) K3(-2,-3.6) K4(-1.2,-3.6) K5(-0.4,-3.6) K6(0.4,-3.6) K7(1.2,-3.6) K8(2,-3.6) K9(2.8,-3.6) K10(3.6,-3.6)
F.SilkS:
  region: -4.6,4.6 -5.1,4.6 -4.6,5.1
  lines w0.254: -4.6,4.28 -4.6,-4.6 4.6,-4.6 4.6,4.6 -4.28,4.6
Top Component Center:
  lines w0.127: -0.127,0 0.127,0 -0.127,0 ; 0,-0.127 0,0.127 0,-0.127
Top Assembly:
  lines w0.254: -4.5,-4.5 -4.5,4 -4,4.5 4.5,4.5 4.5,-4.5 -4.5,-4.5
Top Courtyard:
  lines w0.254: -5.5,-5.5 -5.5,5.5 5.5,5.5 5.5,-5.5 -5.5,-5.5
Top Designator:
  text ".Designator" at -3.432,-0.345 h1.52
3D body "BGA-64_9.0x9.0mm_Layout10x10_P0.8mm.step": height 1.2, standoff -0.01, extent -4.5,-4.5 4.5,4.5

## BGA-68_5.0x5.0mm_Layout9x9_P0.5mm_Ball0.3mm_Pad0.25mm_NSMD [mm] "BGA-68_5.0x5.0mm_Layout9x9_P0.5mm_Ball0.3mm_Pad0.25mm_NSMD"
pads (68):
  round 0.25 smd: A1(-2,2) A2(-1.5,2) A3(-1,2) A4(-0.5,2) A5(0,2) A6(0.5,2) A7(1,2) A8(1.5,2) A9(2,2) B1(-2,1.5) B2(-1.5,1.5) B3(-1,1.5) B4(-0.5,1.5) B5(0,1.5) B6(0.5,1.5) B7(1,1.5) B8(1.5,1.5) B9(2,1.5) C1(-2,1) C2(-1.5,1) C4(-0.5,1) C5(0,1) C6(0.5,1) C8(1.5,1) C9(2,1) D1(-2,0.5) D2(-1.5,0.5) D3(-1,0.5) D7(1,0.5) D8(1.5,0.5) D9(2,0.5) E1(-2,0) E2(-1.5,0) E3(-1,0) E7(1,0) E8(1.5,0) E9(2,0) F1(-2,-0.5) F2(-1.5,-0.5) F3(-1,-0.5) F7(1,-0.5) F8(1.5,-0.5) F9(2,-0.5) G1(-2,-1) G2(-1.5,-1) G4(-0.5,-1) G5(0,-1) G6(0.5,-1) G8(1.5,-1) G9(2,-1) H1(-2,-1.5) H2(-1.5,-1.5) H3(-1,-1.5) H4(-0.5,-1.5) H5(0,-1.5) H6(0.5,-1.5) H7(1,-1.5) H8(1.5,-1.5) H9(2,-1.5) J1(-2,-2) J2(-1.5,-2) J3(-1,-2) J4(-0.5,-2) J5(0,-2) J6(0.5,-2) J7(1,-2) J8(1.5,-2) J9(2,-2)
F.SilkS:
  region: -2.6,2.6 -3.1,2.6 -2.6,3.1
  lines w0.254: -2.6,2.28 -2.6,-2.6 2.6,-2.6 2.6,2.6 -2.28,2.6
Top Component Center:
  lines w0.127: -0.127,0 0.127,0 -0.127,0 ; 0,-0.127 0,0.127 0,-0.127
Top Assembly:
  lines w0.254: -2.5,-2.5 -2.5,2 -2,2.5 2.5,2.5 2.5,-2.5 -2.5,-2.5
Top Courtyard:
  lines w0.254: -3.5,-3.5 -3.5,3.5 3.5,3.5 3.5,-3.5 -3.5,-3.5
Top Designator:
  text ".Designator" at -3.432,-0.345 h1.52
3D body "BGA-68_5.0x5.0mm_Layout9x9_P0.5mm_Ball0.3mm_Pad0.25mm_NSMD.step": height 1.05, standoff -0.01, extent -2.5,-2.5 2.5,2.5